# Altium footprint library NX32F001T-塑料壳扳手角磨链锯通用.PcbLib: 21 footprints (part 2 of 2)
Each footprint in its own frame and in the unit in brackets; x right, y up, seen from the top. Pads: shape width x height; smd on the part's side, far side on the other; paste and mask are expansions set on the pad; w line width, h text height; cw(c..) or ccw(c..) is an arc to the next point about the centre after c.
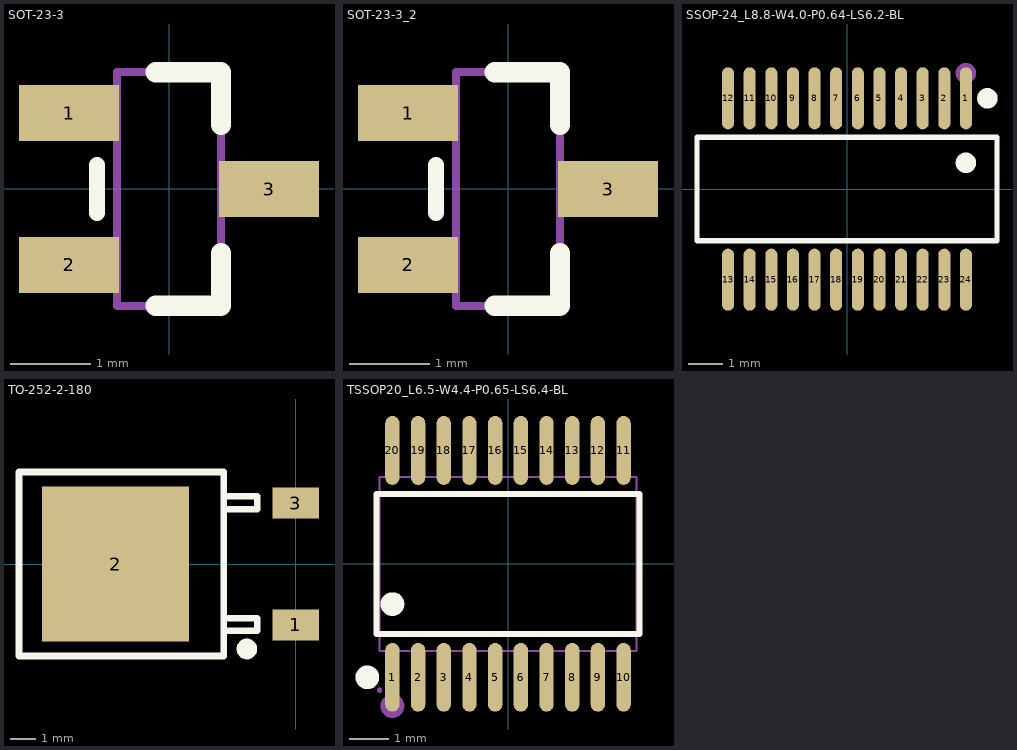
[diagram p1: the footprints below, top view; thin cyan lines are the x and y axes]

## SOT-23-3 [mm]
height 1.25
pads (3):
  rect 1.25x0.7 smd: 1(-1.25,0.95) 2(-1.25,-0.95) 3(1.25,0)
Top Overlay:
  lines w0.2: -0.9,-0.3 -0.9,0.3
  lines w0.254: -0.165,-1.46 0.65,-1.46 ; -0.165,1.46 0.65,1.46 0.65,0.8 ; 0.65,-1.46 0.65,-0.8 ; 0.65,-1.46 0.65,-0.8 ; 0.65,-1.46 0.65,-0.8
Mechanical 13:
  lines w0.1: -0.65,-1.46 -0.65,1.46 ; -0.65,-1.46 0.65,-1.46 ; -0.65,-1.46 -0.65,1.46 ; -0.65,-1.46 0.65,-1.46 ; -0.65,-1.46 0.65,-1.46 ; -0.65,-1.46 -0.65,1.46 ; -0.65,1.46 0.65,1.46 ; -0.65,1.46 0.65,1.46 ; -0.65,1.46 0.65,1.46 ; 0.65,-1.46 0.65,1.46 ; 0.65,-1.46 0.65,1.46 ; 0.65,-1.46 0.65,1.46
3D body "SOT-23.step": height 1.3, standoff 0, extent -1.5,-1.5 1.5,1.5

## SOT-23-3_2 [mm]
pads (3):
  rect 1.25x0.7 smd: 1(-1.25,0.95) 2(-1.25,-0.95) 3(1.25,0)
Top Overlay:
  lines w0.2: -0.9,-0.3 -0.9,0.3
  lines w0.254: -0.165,-1.46 0.65,-1.46 ; -0.165,1.46 0.65,1.46 0.65,0.8 ; 0.65,-1.46 0.65,-0.8 ; 0.65,-1.46 0.65,-0.8 ; 0.65,-1.46 0.65,-0.8
Mechanical 13:
  lines w0.1: -0.65,-1.46 -0.65,1.46 ; -0.65,-1.46 0.65,-1.46 ; -0.65,-1.46 -0.65,1.46 ; -0.65,-1.46 0.65,-1.46 ; -0.65,-1.46 0.65,-1.46 ; -0.65,-1.46 -0.65,1.46 ; -0.65,1.46 0.65,1.46 ; -0.65,1.46 0.65,1.46 ; -0.65,1.46 0.65,1.46 ; 0.65,-1.46 0.65,1.46 ; 0.65,-1.46 0.65,1.46 ; 0.65,-1.46 0.65,1.46
3D body "SOT-23.step": height 1.3, standoff 0, extent -1.5,-1.5 1.5,1.5

## SSOP-24_L8.8-W4.0-P0.64-LS6.2-BL [mil]
pads (24):
  oval 14x71.8 smd: 1(137.5,104.8) 2(112.5,104.8) 3(87.5,104.8) 4(62.5,104.8) 5(37.5,104.8) 6(12.5,104.8) 7(-12.5,104.8) 8(-37.5,104.8) 9(-62.5,104.8) 10(-87.5,104.8) 11(-112.5,104.8) 12(-137.5,104.8) 13(-137.5,-104.8) 14(-112.5,-104.8) 15(-87.5,-104.8) 16(-62.5,-104.8) 17(-37.5,-104.8) 18(-12.5,-104.8) 19(12.5,-104.8) 20(37.5,-104.8) 21(62.5,-104.8) 22(87.5,-104.8) 23(112.5,-104.8) 24(137.5,-104.8)
Top Overlay:
  circle w11.81: c162.31,104.8 r5.91
  circle w11.81: c137.5,30.28 r5.91
  lines w6: -173.28,-59.9 -173.28,59.9 173.28,59.9 173.28,-59.9 -173.28,-59.9
Mechanical 15:
  circle w11.81: c137.5,133.86 r5.91

## TO-252-2-180 [mm] "180度编带包装"
height 0.9
pads (3):
  rect 1.8x1.2 smd: 1(0,-2.361) 3(-0.004,2.361)
  rect 5.7x6 smd: 2(-7,0)
Top Overlay:
  circle w0.4: c-1.9,-3.3 r0.2
  lines w0.254: -2.804,2.123 -1.504,2.123 -1.504,2.623 -2.804,2.623 ; -2.8,-2.6 -1.5,-2.6 -1.5,-2.1 -2.8,-2.1 ; -10.75,-3.573 -2.8,-3.573 -2.8,3.573 -10.75,3.573 -10.75,-3.573
3D body "TO-252.STEP": height 2.44, standoff 0.03, extent -9.738,-3.27 0.2,3.27

## TSSOP20_L6.5-W4.4-P0.65-LS6.4-BL [mm]
pads (20):
  oval 0.364x1.742 smd: 1(-2.925,-2.871) 2(-2.275,-2.871) 3(-1.625,-2.871) 4(-0.975,-2.871) 5(-0.325,-2.871) 6(0.325,-2.871) 7(0.975,-2.871) 8(1.625,-2.871) 9(2.275,-2.871) 10(2.925,-2.871) 11(2.925,2.871) 12(2.275,2.871) 13(1.625,2.871) 14(0.975,2.871) 15(0.325,2.871) 16(-0.325,2.871) 17(-0.975,2.871) 18(-1.625,2.871) 19(-2.275,2.871) 20(-2.925,2.871)
Top Overlay:
  circle w0.3: c-2.925,-1.019 r0.15
  circle w0.3: c-3.559,-2.871 r0.15
  lines w0.152: -3.326,-1.771 -3.326,1.771 3.326,1.771 3.326,-1.771 -3.326,-1.771
Mechanical 6:
  circle w0.3: c-2.925,-3.6 r0.15
Mechanical 15:
  drawing of 45 lines, arcs and shapes, not listed